# Altium footprint library 629104190121.PcbLib: 1 footprints
Each footprint in its own frame and in the unit in brackets; x right, y up, seen from the top. Pads: shape width x height; smd on the part's side, far side on the other; paste and mask are expansions set on the pad; w line width, h text height; cw(c..) or ccw(c..) is an arc to the next point about the centre after c.
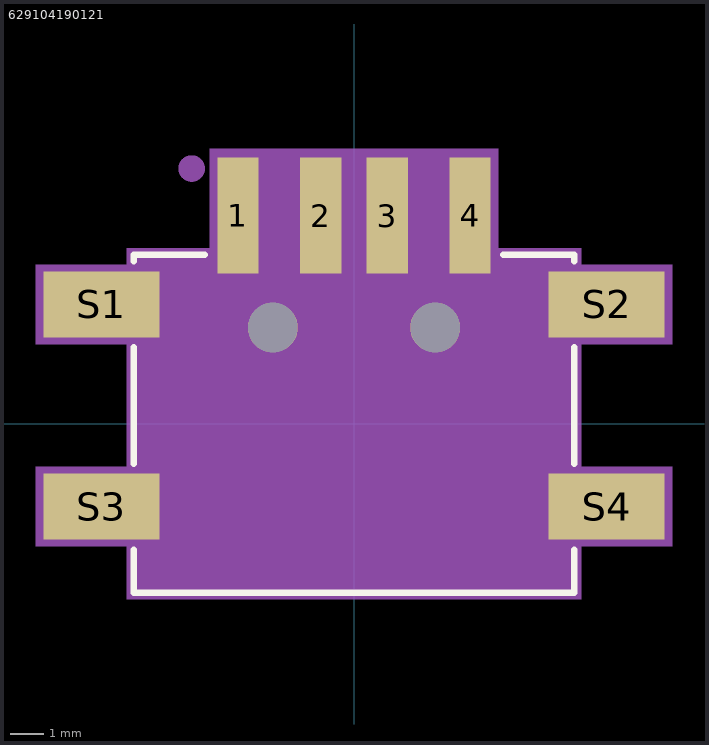
[diagram p0: the footprint, top view; thin cyan lines are the x and y axes]

## 629104190121 [mm]
pads (10):
  rect 1.25x3.5 smd: 1(-3.5,6.28) 2(-1,6.28) 3(1,6.28) 4(3.5,6.28)
  rect 3.5x2 smd: S1(-7.625,3.6) S2(7.625,3.6) S3(-7.625,-2.5) S4(7.625,-2.5)
  round 1.5 hole 1.5 unplated: ""(-2.45,2.9) ""(2.45,2.9)
Top Overlay:
  lines w0.2: -6.65,-3.8 -6.65,-5.1 6.65,-5.1 6.65,-3.8 ; -6.65,-1.2 -6.65,2.3 ; -6.65,4.9 -6.65,5.1 -4.5,5.1 ; 4.5,5.1 6.65,5.1 6.65,4.9 ; 6.65,-1.2 6.65,2.3
Assembly Top:
  circle w0.4: c-4.9,7.7 r0.2
  lines w0.1: -0.1,-3.8 0.1,-4 ; 0.1,-3.6 0.1,-4 ; 0.3,-3.8 0.1,-4 ; -6.55,-4 -6.55,-5 6.55,-5 6.55,-4 ; -6.55,-4 -6.55,5 6.55,5 6.55,-4 ; -6.55,-4 6.55,-4
  text "PCB Edge" at -1.2,-3.5 h0.41
Courtyard Top:
  region: 4.35,5.3 6.85,5.3 6.85,4.8 9.6,4.8 9.6,2.4 6.85,2.4 6.85,-1.3 9.6,-1.3 9.6,-3.7 6.85,-3.7 6.85,-5.3 -6.85,-5.3 -6.85,-3.7 -9.6,-3.7 -9.6,-1.3 -6.85,-1.3 -6.85,2.4 -9.6,2.4 -9.6,4.8 -6.85,4.8 -6.85,5.3 -4.35,5.3 -4.35,8.3 4.35,8.3
3D body "629104190121.stp": height 6.45, standoff -0.02, extent -8.25,-4.944 8.25,6.165